# Altium schematic symbol library Schlib1.SchLib: 16 symbols
Pins are listed as number, name and electrical type; pins without a type are passive.

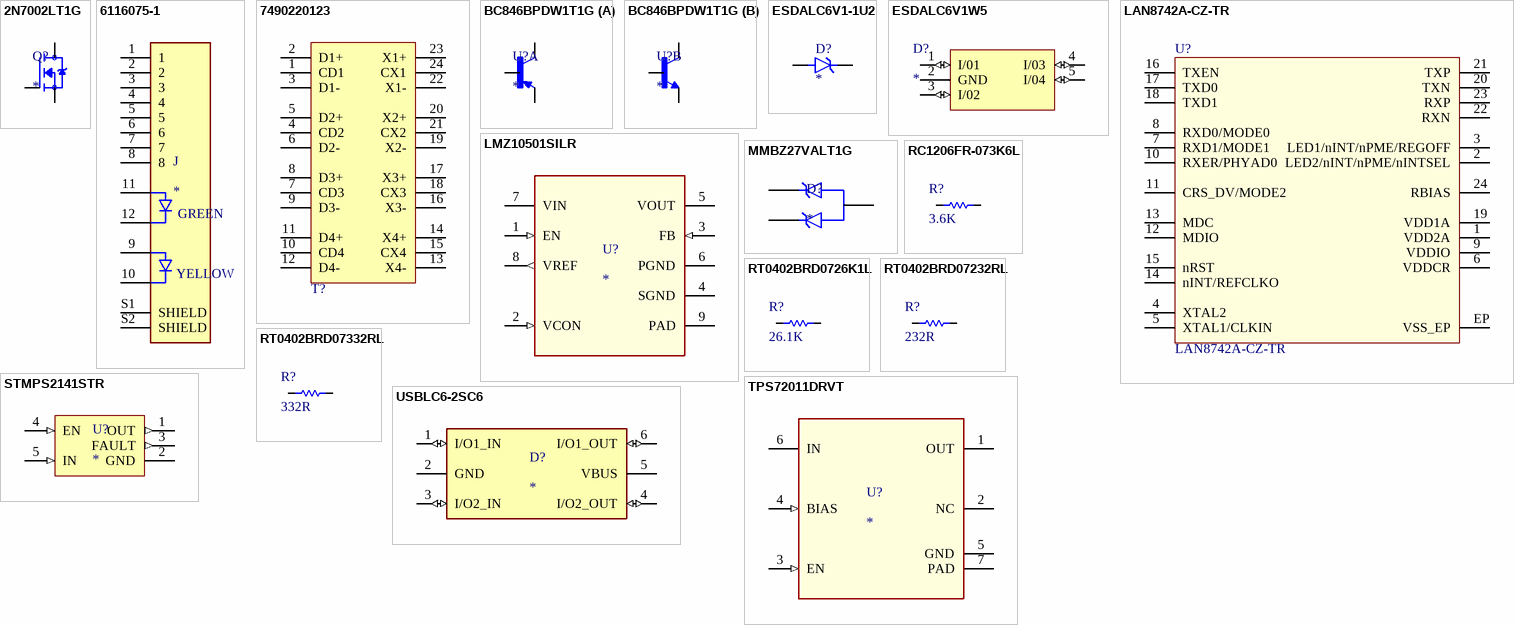
[diagram p0: symbols 2N7002LT1G to USBLC6-2SC6]

## 2N7002LT1G
designator Q?
N-Channel 60 V 115mA (Tc) 225mW (Ta) Surface Mount SOT-23-3 (TO-236); MP: 2N7002LT1G; MF: ON Semiconductor; Price: None; Availability: In Stock; Package: SOT-23-3 ON Semiconductor; Value: *; SnapEDA_Link: https://www.snapeda.com/parts/2N7002LT1G/Onsemi/view-part/?ref=snap; Purchase-URL: https://pricing.snapeda.com/search/part/2N7002LT1G/?ref=eda; Check_prices: https://www.snapeda.com/parts/2N7002LT1G/Onsemi/view-part/?ref=eda
footprint SOT95P240X111-3N
pins: 1 G, 2 S, 3 D

## 6116075-1
designator J
Conn Telephone/Telecom F 8 POS 2.54mm Solder RA Thru-Hole 12 Terminal 1 Port Tray; MF: TE Connectivity; MP: 6116075-1; Value: *; TE_purchase_URL: https://www.te.com/usa-en/product-6116075-1.html?te_bu=Cor&te_type=disp&te_campaign=seda_glo_cor-seda-global-disp-prtnr-fy19-seda-model-bom-cta_sma-317_1&elqCampaignId=32493; Package: None; Digi-Key_Purchase_URL: https://www.digikey.com.tr/product-detail/en/te-connectivity-amp-connectors/6116075-1/A130943-ND/2262413?utm_source=snapeda&utm_medium=aggregator&utm_campaign=symbol; SnapEDA_Link: https://www.snapeda.com/parts/6116075-1/TE%20Connectivity%20AMP%20Connectors/view-part/2744115/?ref=snap; Digi-Key_Part_Number: A130943-ND
footprint TE_6116075-1
pins: 1, 2, 3, 4, 5, 6, 7, 8, 9 LED_YELLOW_ANODE, 10 LED_YELLOW_CATHODE, 11 LED_GREEN_ANODE, 12 LED_GREEN_CATHODE, S1 SHIELD, S2 SHIELD
text: GREEN; YELLOW

## 7490220123
designator T?, comment 1000 Base-T, 1 Port  (value not drawn)
WE-LAN LAN Transformer, SMT, 1000 Base-T, 1 Port, 200uH; Manufacturer Part Number: 7490220123; Manufacturer: Wurth Elektronik; HPLE: No; Insulation Test Voltage: 1500Vrms; Number of Ports: 1; PoE: 4PPoE (up to 1500 mA); Turns Ratio: 1:1; Category: Signal Transformers; Match Code: WE-LAN; ComponentLink1Description: Website Link; ComponentLink1URL: https://www.we-online.com/redexpert/article/7490220123?ad; ComponentLink2Description: Datasheet Link; ComponentLink2URL: https://www.we-online.com/redexpert/spec/7490220123?ad; Mount: Surface Mount; Operating Temperature Max: 105°C; Operating Temperature Min: -40°C; Packaging: Tape and Reel; Length: 18.29mm; Width: 14.7mm; Height: 8.8mm; Data Rate: 1000 Base-T; Inductance: 200uH
footprint 7490220123
pins: 1 CD1, 2 D1+, 3 D1-, 4 CD2, 5 D2+, 6 D2-, 7 CD3, 8 D3+, 9 D3-, 10 CD4, 11 D4+, 12 D4-, 13 X4-, 14 X4+, 15 CX4, 16 X3-, 17 X3+, 18 CX3, 19 X2-, 20 X2+, 21 CX2, 22 X1-, 23 X1+, 24 CX1

## BC846BPDW1T1G
designator U?
Bipolar (BJT) Transistor Array NPN, PNP 45V 100mA 100MHz 380mW Surface Mount SC-88/SC70-6/SOT-363; MP: BC846BPDW1T1G; Package: None; Price: None; Value: *; Availability: Unavailable
footprint SOT65P210X110-6N
part A pins: 3 C1, 4 E1, 5 B1
part B pins: 1 E2, 2 B2, 6 C2

## ESDALC6V1-1U2
designator D?
- Clamp - Ipp Tvs Diode Surface Mount ST0201; MF: STMicroelectronics; MP: ESDALC6V1-1U2; SnapEDA_Link: https://www.snapeda.com/parts/ESDALC6V1-1U2/STMicroelectronics/view-part/?ref=snap; Package: 0201 STMicroelectronics; Value: *; Check_prices: https://www.snapeda.com/parts/ESDALC6V1-1U2/STMicroelectronics/view-part/?ref=eda
footprint DIODE_ESDALC6V1-1U2
pins: 1 K, 2 A

## ESDALC6V1W5
designator D?
- Clamp - Ipp Tvs Diode Surface Mount SOT-323-5; MF: STMicroelectronics; MP: ESDALC6V1W5; SnapEDA_Link: https://www.snapeda.com/parts/ESDALC6V1W5/STMicroelectronics/view-part/?ref=snap; Package: SOT-323 STMicroelectronics; Value: *; Check_prices: https://www.snapeda.com/parts/ESDALC6V1W5/STMicroelectronics/view-part/?ref=eda
footprint SOT65P210X110-5N
pins: 1 I/01 (io), 2 GND (power), 3 I/02 (io), 4 I/03 (io), 5 I/04 (io)

## LAN8742A-CZ-TR
designator U?
10/100M RMII Ethernet transceiver; Internal_Part_Number: MCD-00719; Part_Type: IC; Manufacturer: MICROCHIP; Provided_By: SUBCO; Status: Released; Manufacturer_Part_Number: LAN8742A-CZ-TR; ComponentLink1Description: Datasheet; ComponentLink1URL: http://tunmcdsvn.tun.st.com/Component_Datasheet_Library/Trunk/IC/MICROCHIP_LAN8742A_RMII_PHY; ECCN_US: n/a; ECCN_EU: n/a; Value: LAN8742A-CZ-TR
footprint ICC_VQFN24-EPAD_4X4_P050
pins: 1 VDD2A, 2 LED2/nINT/nPME/nINTSEL, 3 LED1/nINT/nPME/REGOFF, 4 XTAL2, 5 XTAL1/CLKIN, 6 VDDCR, 7 RXD1/MODE1, 8 RXD0/MODE0, 9 VDDIO, 10 RXER/PHYAD0, 11 CRS_DV/MODE2, 12 MDIO, 13 MDC, 14 nINT/REFCLKO, 15 nRST, 16 TXEN, 17 TXD0, 18 TXD1, 19 VDD1A, 20 TXN, 21 TXP, 22 RXN, 23 RXP, 24 RBIAS, EP VSS_EP

## LMZ10501SILR
designator U?
No Description Available; Mfr_Name: Texas Instruments; TYPE: TYPE; RefDes: RefDes
footprint SIL0008A
pins: 1 EN (in), 2 VCON (in), 3 FB (in), 4 SGND (power), 5 VOUT (power), 6 PGND (power), 7 VIN (power), 8 VREF (out), 9 PAD (power)

## MMBZ27VALT1G
designator D?
46V Clamp 870mA Ipp Tvs Diode Surface Mount SOT-23-3 (TO-236); MP: MMBZ27VALT1G; Package: None; Price: None; Value: *; Availability: Unavailable
footprint SOT95P237X111-3N
pins: 1 K1, 2 K2, 3 A

## RC1206FR-073K6L
designator R?, comment 3.6K
RES SMD 3.6KOHM 1% 1/4W 1206
footprint Res-1206
pins: 1, 2

## RT0402BRD0726K1L
designator R?, comment 26.1K
RES SMD 26.1KOHM 0.1% 1/16W 0402
footprint Res-0402
pins: 1, 2

## RT0402BRD07232RL
designator R?, comment 232R
RES SMD 232 OHM 0.1% 1/16W 0402
footprint Res-0402
pins: 1, 2

## RT0402BRD07332RL
designator R?, comment 332R
RES SMD 332 OHM 0.1% 1/16W 0402
footprint Res-0402
pins: 1, 2

## STMPS2141STR
designator U?
Power Switch/Driver 1:1 N-Channel 500mA SOT-23-5; MP: STMPS2141STR; MF: STMicroelectronics; Package: SOT-23 STMicroelectronics; Purchase-URL: https://pricing.snapeda.com/search/part/STMPS2141STR/?ref=eda; Check_prices: https://www.snapeda.com/parts/STMPS2141STR/STMicroelectronics/view-part/?ref=eda; Value: *; Digi-Key_Part_Number: 497-6933-2-ND; SnapEDA_Link: https://www.snapeda.com/parts/STMPS2141STR/STMicroelectronics/view-part/?ref=snap
footprint SOT95P280X145-5N
pins: 1 OUT (out), 2 GND (power), 3 FAULT (out), 4 EN (in), 5 IN (in)

## TPS72011DRVT
designator U?
No Description Available; Mfr_Name: Texas Instruments; PartNumber: TPS72011DRVR; Alternate_PartNumber: TPS72011DRVT; CompType: IC; TYPE: TYPE; RefDes: RefDes; PackageReference: DRV0006A; MountType: SMT; RoHS: Y; Manufacturer: Texas Instruments
footprint DRV0006A
pins: 1 OUT (power), 2 NC, 3 EN (in), 4 BIAS (in), 5 GND (power), 6 IN (power), 7 PAD (power)

## USBLC6-2SC6
designator D?
17V Clamp 5A (8/20Âµs) Ipp Tvs Diode Surface Mount SOT-23-6; MF: STMicroelectronics; MP: USBLC6-2SC6; Value: *; SnapEDA_Link: https://www.snapeda.com/parts/USBLC6-2SC6/STMicroelectronics/view-part/?ref=snap; Check_prices: https://www.snapeda.com/parts/USBLC6-2SC6/STMicroelectronics/view-part/?ref=eda; Purchase-URL: https://pricing.snapeda.com/search/part/USBLC6-2SC6/?ref=eda; Price: None; Availability: In Stock; Package: SOT-23-6 STMicroelectronics
footprint SOT95P280X145-6N
pins: 1 I/O1_IN (io), 2 GND (power), 3 I/O2_IN (io), 4 I/O2_OUT (io), 5 VBUS (power), 6 I/O1_OUT (io)